# Altium footprint library PCB_Libraries.PcbLib: 49 footprints (part 3 of 4)
Each footprint in its own frame and in the unit in brackets; x right, y up, seen from the top. Pads: shape width x height; smd on the part's side, far side on the other; paste and mask are expansions set on the pad; w line width, h text height; cw(c..) or ccw(c..) is an arc to the next point about the centre after c.
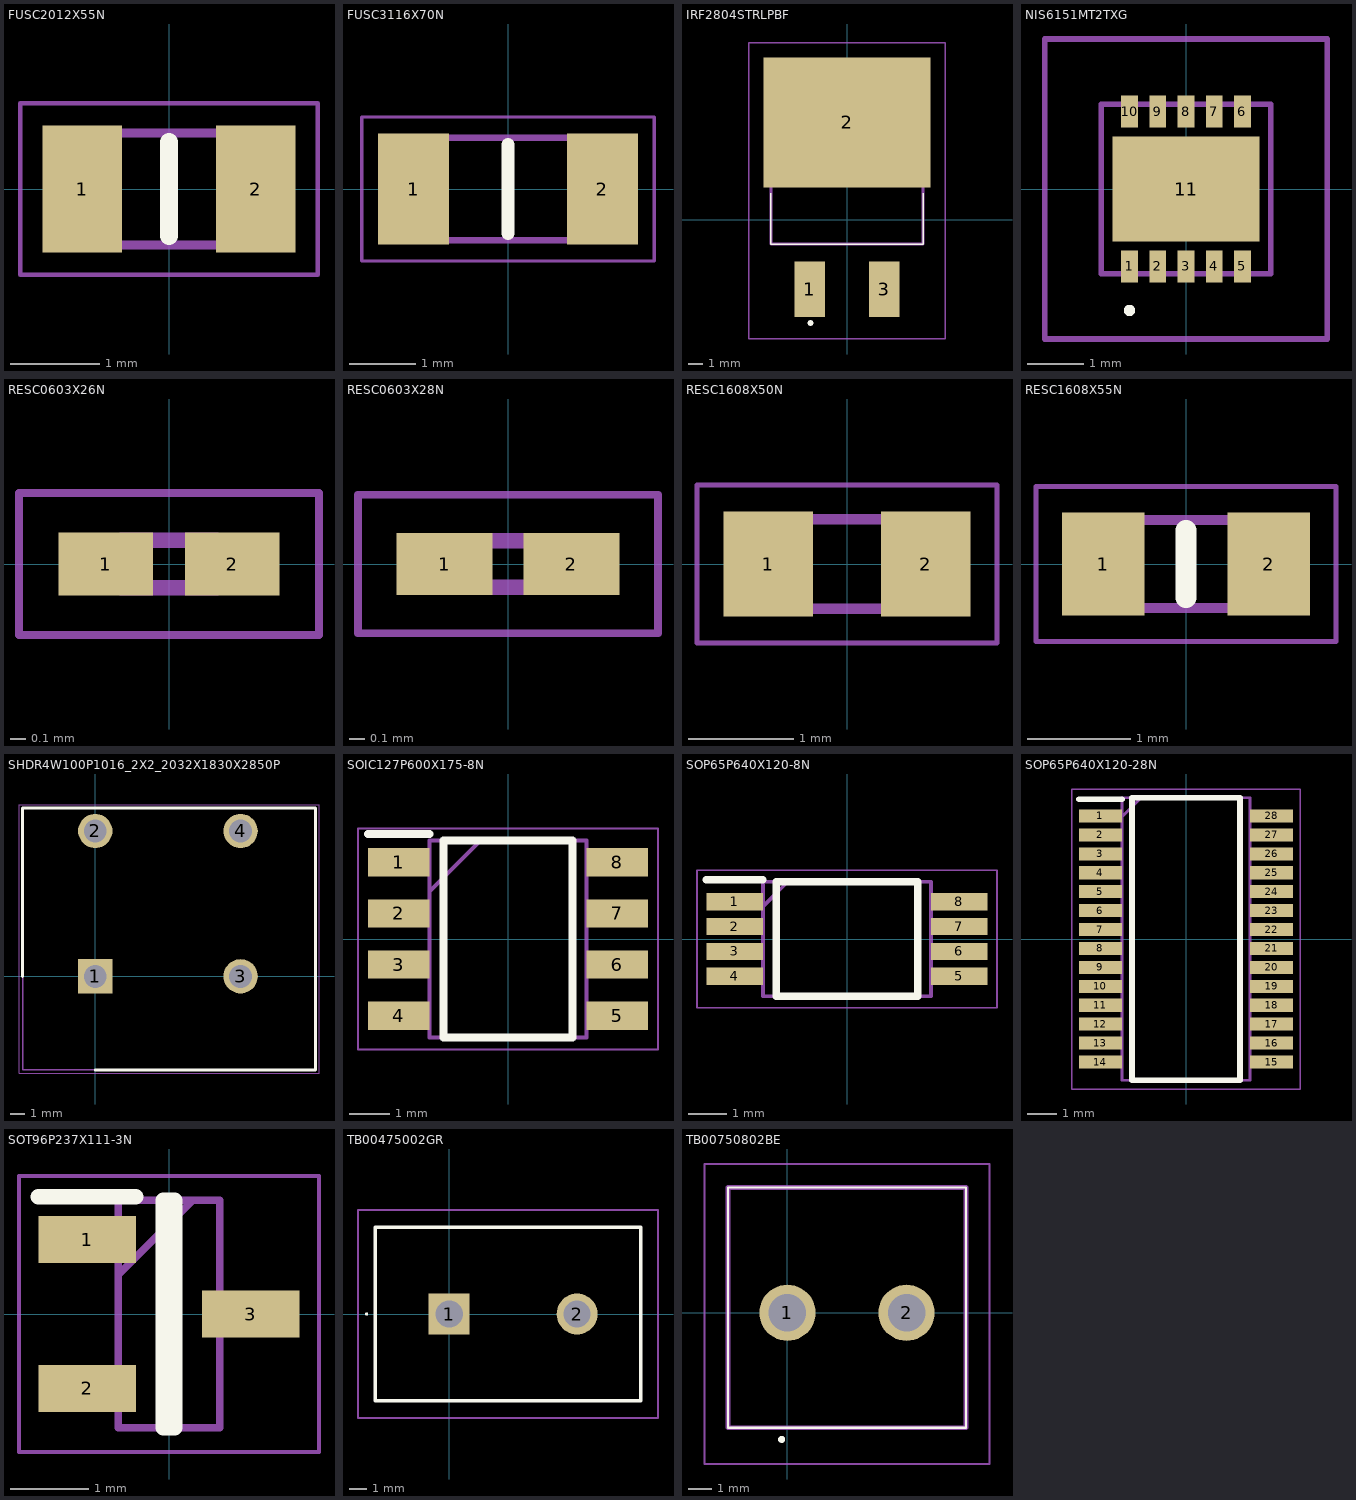
[diagram p2: the footprints below, top view; thin cyan lines are the x and y axes]

## FUSC2012X55N [mm]
pads (2):
  rect 0.89x1.42 smd: 1(-0.97,0) 2(0.97,0)
Top Overlay:
  lines w0.2: 0,-0.525 0,0.525
Mechanical 13:
  lines w0.1: -1,-0.625 -1,0.625 1,0.625 1,-0.625 -1,-0.625
Mechanical 15:
  lines w0.05: -1.665,-0.96 -1.665,0.96 1.665,0.96 1.665,-0.96 -1.665,-0.96
3D body "MFU0805FF00500P100.stp": height 0.55, standoff 0, extent -1,-0.625 1,0.625

## FUSC3116X70N [mm]
pads (2):
  rect 1.07x1.68 smd: 1(-1.43,0) 2(1.43,0)
Top Overlay:
  lines w0.2: 0,-0.675 0,0.675
Mechanical 13:
  lines w0.1: -1.55,-0.775 -1.55,0.775 1.55,0.775 1.55,-0.775 -1.55,-0.775
Mechanical 15:
  lines w0.05: -2.215,-1.09 -2.215,1.09 2.215,1.09 2.215,-1.09 -2.215,-1.09
3D body "SF-1206FP100-2.stp": height 0.7, standoff 0, extent -1.55,-0.775 1.55,0.775

## IRF2804STRLPBF [mm]
pads (3):
  rect 2.08x3.81 smd: 1(-2.54,-4.75) 3(2.54,-4.75)
  rect 11.43x8.89 smd: 2(0,6.68)
Top Overlay:
  lines w0.1: -5.207,1.845 -5.207,-1.655 5.207,-1.655 5.207,1.845
  lines w0.2: -2.6,-7.055 cw(c-2.5,-7.055) -2.4,-7.055 cw(c-2.5,-7.055) -2.6,-7.055
Mechanical 13:
  lines w0.2: -5.207,-1.655 5.207,-1.655 5.207,7.155 -5.207,7.155 -5.207,-1.655
Mechanical 15:
  lines w0.1: -6.715,-8.155 -6.715,12.125 6.715,12.125 6.715,-8.155 -6.715,-8.155
3D body "IRLZ44NSTRLPBF.stp": height 4.19, standoff 0.01, extent -4.825,-5.955 4.825,9.925

## NIS6151MT2TXG [mm]
pads (11):
  rect 0.3x0.57 smd: 1(-1,-1.37) 2(-0.5,-1.37) 3(0,-1.37) 4(0.5,-1.37) 5(1,-1.37) 6(1,1.37) 7(0.5,1.37) 8(0,1.37) 9(-0.5,1.37) 10(-1,1.37)
  rect 2.6x1.85 smd: 11(0,0)
Top Overlay:
  lines w0.1: -1,-2.2 cw(c-1,-2.15) -1,-2.1 cw(c-1,-2.15) -1,-2.2
Mechanical 13:
  lines w0.1: -1.5,-1.5 -1.5,1.5 1.5,1.5 1.5,-1.5 -1.5,-1.5
Mechanical 15:
  lines w0.1: -2.5,-2.655 -2.5,2.655 2.5,2.655 2.5,-2.655 -2.5,-2.655
3D body "NIS6151MT2TXG.stp": height 0.9, standoff 0, extent -1.5,-1.5 1.5,1.5

## PCBComponent_1 [mm]

## RESC0603X26N [mm]
pads (2):
  rect 0.6x0.4 smd: 1(-0.4,0) 2(0.4,0)
Mechanical 13:
  lines w0.1: -0.3,-0.15 -0.3,0.15 0.3,0.15 0.3,-0.15 -0.3,-0.15
Mechanical 15:
  lines w0.05: -0.95,-0.45 -0.95,0.45 0.95,0.45 0.95,-0.45 -0.95,-0.45
3D body "TNPW0201200RBEED.stp": height 0.15, standoff -0.15, extent -0.31,-0.125 0.31,0.125

## RESC0603X28N [mm]
pads (2):
  rect 0.625x0.4 smd: 1(-0.412,0) 2(0.412,0)
Mechanical 13:
  lines w0.1: -0.3,-0.15 -0.3,0.15 0.3,0.15 0.3,-0.15 -0.3,-0.15
Mechanical 15:
  lines w0.05: -0.975,-0.45 -0.975,0.45 0.975,0.45 0.975,-0.45 -0.975,-0.45
3D body "CRCW020110K0FNED.stp": height 0.28, standoff 0, extent -0.3,-0.15 0.3,0.15

## RESC1608X50N [mm]
pads (2):
  rect 0.85x1 smd: 1(-0.75,0) 2(0.75,0)
Mechanical 13:
  lines w0.1: -0.788,-0.425 -0.788,0.425 0.788,0.425 0.788,-0.425 -0.788,-0.425
Mechanical 15:
  lines w0.05: -1.425,-0.75 -1.425,0.75 1.425,0.75 1.425,-0.75 -1.425,-0.75
3D body "CRCW0603120RJNEB.stp": height 0.45, standoff 0, extent -0.77,-0.43 0.78,0.42

## RESC1608X55N [mm]
pads (2):
  rect 0.8x1 smd: 1(-0.8,0) 2(0.8,0)
Top Overlay:
  lines w0.2: 0,-0.325 0,0.325
Mechanical 13:
  lines w0.1: -0.775,-0.425 0.775,-0.425 0.775,0.425 -0.775,0.425 -0.775,-0.425
Mechanical 15:
  lines w0.05: -1.45,-0.75 1.45,-0.75 1.45,0.75 -1.45,0.75 -1.45,-0.75
3D body "MCT06030C2203FP500.stp": height 0.45, standoff 0, extent -0.77,-0.42 0.78,0.43

## SHDR4W100P1016_2X2_2032X1830X2850P [mm]
pads (4):
  rect 2.4x2.4 hole 1.6: 1(0,0)
  round 2.4 hole 1.6: 2(0,10.16) 3(10.16,0) 4(10.16,10.16)
Top Overlay:
  lines w0.2: -5.08,0 -5.08,11.76 15.39,11.76 15.39,-6.54 0,-6.54
Mechanical 13:
  lines w0.1: -5.08,-6.54 15.39,-6.54 15.39,11.76 -5.08,11.76 -5.08,-6.54
Mechanical 15:
  lines w0.05: -5.33,-6.79 15.64,-6.79 15.64,12.01 -5.33,12.01 -5.33,-6.79
3D body "VP026584000AG.stp": height 28.5, standoff -4.6, extent -5.08,-6.54 15.24,11.76

## SOIC127P600X175-8N [mm]
pads (8):
  rect 1.525x0.7 smd: 1(-2.712,1.905) 2(-2.712,0.635) 3(-2.712,-0.635) 4(-2.712,-1.905) 5(2.712,-1.905) 6(2.712,-0.635) 7(2.712,0.635) 8(2.712,1.905)
Top Overlay:
  lines w0.2: -3.475,2.605 -1.95,2.605 ; -1.6,-2.45 -1.6,2.45 1.6,2.45 1.6,-2.45 -1.6,-2.45
Mechanical 13:
  lines w0.1: -1.95,1.18 -0.68,2.45 ; -1.95,-2.45 -1.95,2.45 1.95,2.45 1.95,-2.45 -1.95,-2.45
Mechanical 15:
  lines w0.05: -3.725,-2.75 -3.725,2.75 3.725,2.75 3.725,-2.75 -3.725,-2.75
3D body "MCS1803GS-05-P.stp": height 1.75, standoff 0, extent -3,-2.45 3,2.45

## SOP65P640X120-8N [mm]
pads (8):
  rect 1.475x0.45 smd: 1(-2.938,0.975) 2(-2.938,0.325) 3(-2.938,-0.325) 4(-2.938,-0.975) 5(2.938,-0.975) 6(2.938,-0.325) 7(2.938,0.325) 8(2.938,0.975)
Top Overlay:
  lines w0.2: -3.675,1.55 -2.2,1.55 ; -1.85,-1.5 -1.85,1.5 1.85,1.5 1.85,-1.5 -1.85,-1.5
Mechanical 13:
  lines w0.1: -2.2,0.85 -1.55,1.5 ; -2.2,-1.5 -2.2,1.5 2.2,1.5 2.2,-1.5 -2.2,-1.5
Mechanical 15:
  lines w0.05: -3.925,-1.8 -3.925,1.8 3.925,1.8 3.925,-1.8 -3.925,-1.8
3D body "LM57TSPWRQ1.stp": height 1.11, standoff 0.01, extent -3.21,-1.5 3.21,1.5

## SOP65P640X120-28N [mm]
pads (28):
  rect 1.475x0.45 smd: 1(-2.938,4.225) 2(-2.938,3.575) 3(-2.938,2.925) 4(-2.938,2.275) 5(-2.938,1.625) 6(-2.938,0.975) 7(-2.938,0.325) 8(-2.938,-0.325) 9(-2.938,-0.975) 10(-2.938,-1.625) 11(-2.938,-2.275) 12(-2.938,-2.925) 13(-2.938,-3.575) 14(-2.938,-4.225) 15(2.938,-4.225) 16(2.938,-3.575) 17(2.938,-2.925) 18(2.938,-2.275) 19(2.938,-1.625) 20(2.938,-0.975) 21(2.938,-0.325) 22(2.938,0.325) 23(2.938,0.975) 24(2.938,1.625) 25(2.938,2.275) 26(2.938,2.925) 27(2.938,3.575) 28(2.938,4.225)
Top Overlay:
  lines w0.2: -3.675,4.8 -2.2,4.8 ; -1.85,-4.85 1.85,-4.85 1.85,4.85 -1.85,4.85 -1.85,-4.85
Mechanical 13:
  lines w0.1: -2.2,4.2 -1.55,4.85 ; -2.2,-4.85 2.2,-4.85 2.2,4.85 -2.2,4.85 -2.2,-4.85
Mechanical 15:
  lines w0.05: -3.925,-5.15 3.925,-5.15 3.925,5.15 -3.925,5.15 -3.925,-5.15
3D body "ADS1148IPWR.stp": height 1.13, standoff 0, extent -3.2,-4.85 3.2,4.85

## SOT96P237X111-3N [mm]
pads (3):
  rect 1.25x0.6 smd: 1(-1.05,0.955) 2(-1.05,-0.955) 3(1.05,0)
Top Overlay:
  lines w0.2: -1.675,1.505 -0.425,1.505 ; -0.075,-1.46 -0.075,1.46 0.075,1.46 0.075,-1.46 -0.075,-1.46
Mechanical 13:
  lines w0.1: -0.65,0.505 0.305,1.46 ; -0.65,-1.46 -0.65,1.46 0.65,1.46 0.65,-1.46 -0.65,-1.46
Mechanical 15:
  lines w0.05: -1.925,-1.77 -1.925,1.77 1.925,1.77 1.925,-1.77 -1.925,-1.77
3D body "NVR4003NT3G.stp": height 1.11, standoff 0, extent -1.185,-1.46 1.185,1.46

## TB00475002GR [mm]
pads (2):
  rect 2.4x2.4 hole 1.6: 1(0,0)
  round 2.4 hole 1.6: 2(7.5,0)
Top Overlay:
  lines w0.1: -4.9,0 ccw(c-4.85,0) -4.8,0 ccw(c-4.85,0) -4.9,0
  lines w0.2: -4.35,-5.1 -4.35,5.1 11.25,5.1 11.25,-5.1 -4.35,-5.1
Mechanical 13:
  lines w0.1: -4.35,-5.1 -4.35,5.1 11.25,5.1 11.25,-5.1 -4.35,-5.1
Mechanical 15:
  lines w0.1: -5.35,-6.1 -5.35,6.1 12.25,6.1 12.25,-6.1 -5.35,-6.1
3D body "TB004-750-02GR.stp": height 14.6, standoff -5, extent -4.35,-5.1 11.25,5.1

## TB00750802BE [mm]
pads (2):
  round 2.4 hole 1.6: 1(0,0) 2(5.08,0)
Top Overlay:
  lines w0.1: -2.54,-4.9 -2.54,5.35 7.62,5.35 7.62,-4.9 -2.54,-4.9
  lines w0.2: -0.3,-5.4 ccw(c-0.25,-5.4) -0.2,-5.4 ; -0.3,-5.4 cw(c-0.25,-5.4) -0.2,-5.4 ; -0.3,-5.4 ccw(c-0.25,-5.4) -0.2,-5.4
Mechanical 13:
  lines w0.2: -2.54,-4.9 -2.54,5.35 7.62,5.35 7.62,-4.9 -2.54,-4.9
Mechanical 15:
  lines w0.1: -3.54,-6.45 -3.54,6.35 8.62,6.35 8.62,-6.45 -3.54,-6.45
3D body "TB007-508-02BE.stp": height 14.1, standoff -5, extent -2.54,-4.9 7.62,5.35